# Altium footprint library Connector.PcbLib: 272 footprints (part 10 of 17)
Each footprint in its own frame and in the unit in brackets; x right, y up, seen from the top. Pads: shape width x height; smd on the part's side, far side on the other; paste and mask are expansions set on the pad; w line width, h text height; cw(c..) or ccw(c..) is an arc to the next point about the centre after c.
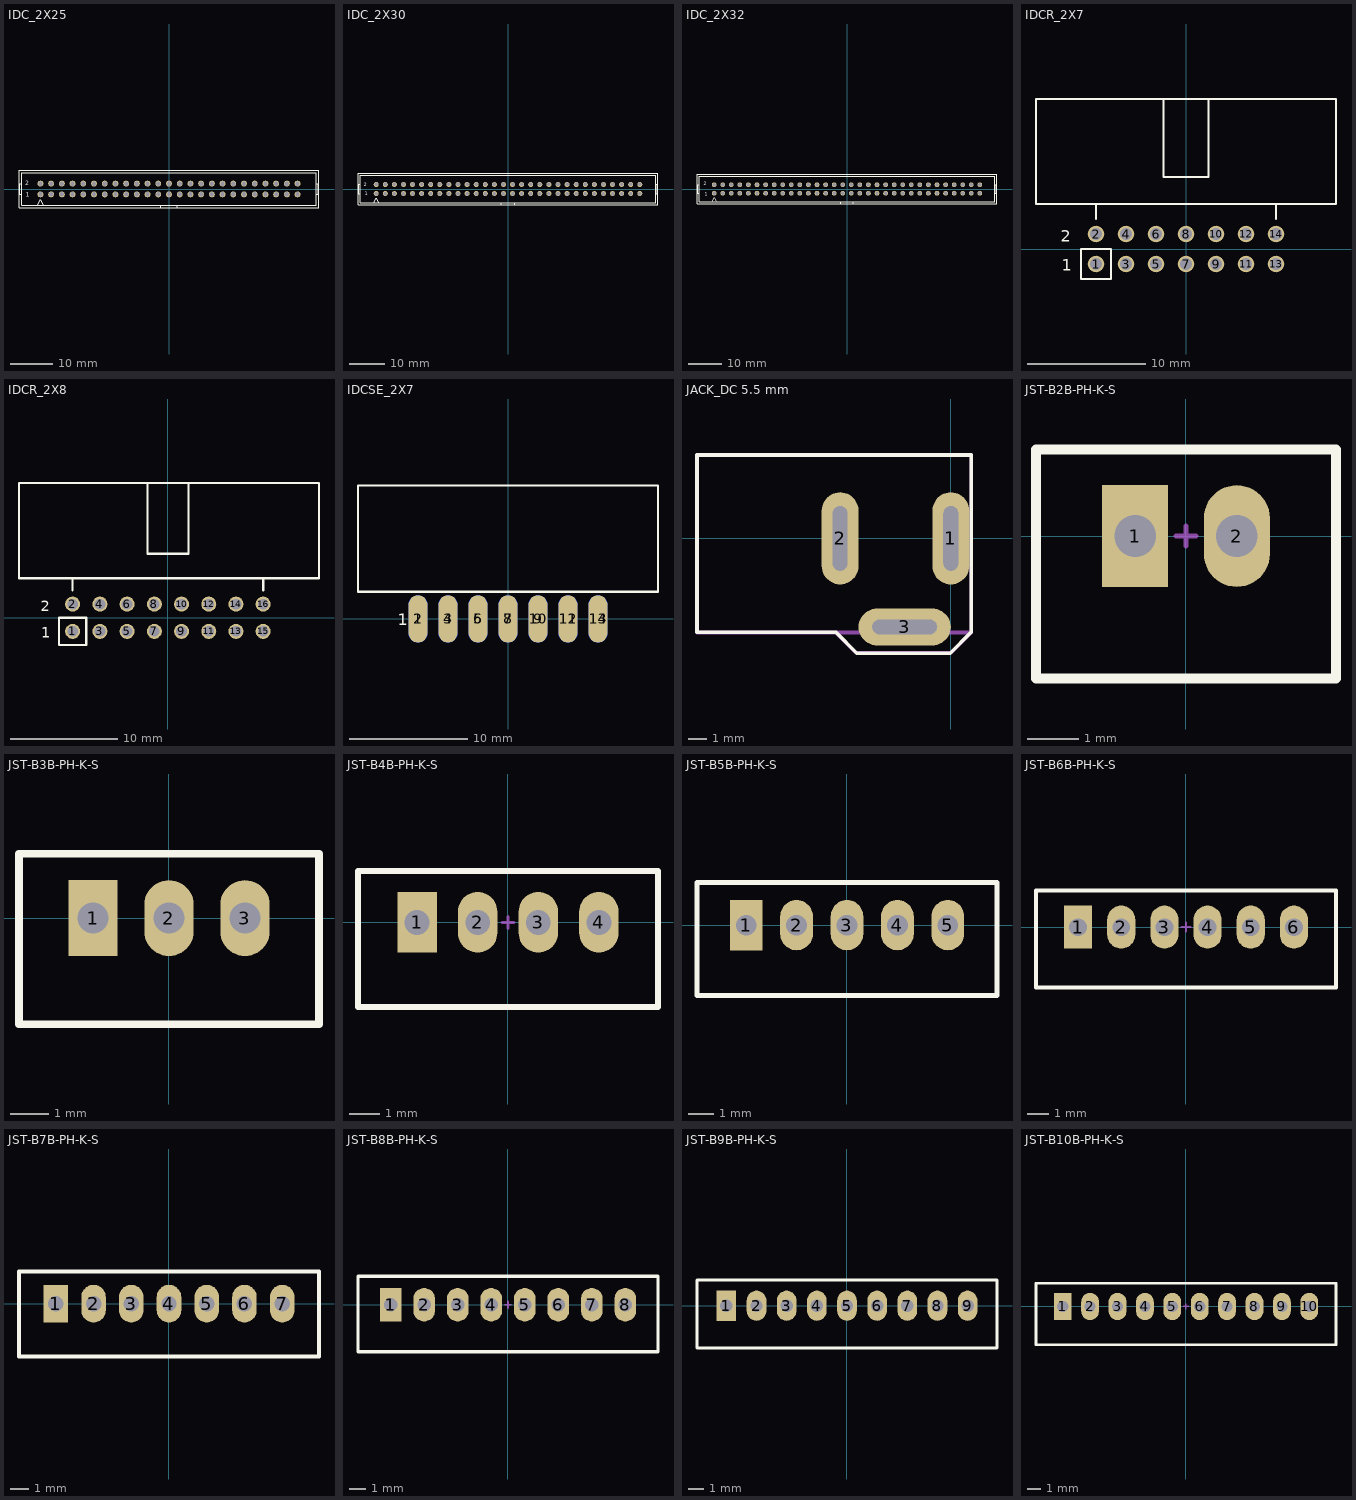
[diagram p9: the footprints below, top view; thin cyan lines are the x and y axes]

## IDC_2X25 [mm]
pads (50):
  round 1.4 / inner round 1.4 / far side oval 1.4x2.2 hole 1 mask+0.1: 1(-30.48,-1.27) 2(-30.48,1.27) 3(-27.94,-1.27) 4(-27.94,1.27) 5(-25.4,-1.27) 6(-25.4,1.27) 7(-22.86,-1.27) 8(-22.86,1.27) 9(-20.32,-1.27) 10(-20.32,1.27) 11(-17.78,-1.27) 12(-17.78,1.27) 13(-15.24,-1.27) 14(-15.24,1.27) 15(-12.7,-1.27) 16(-12.7,1.27) 17(-10.16,-1.27) 18(-10.16,1.27) 19(-7.62,-1.27) 20(-7.62,1.27) 21(-5.08,-1.27) 22(-5.08,1.27) 23(-2.54,-1.27) 24(-2.54,1.27) 25(0,-1.27) 26(0,1.27) 27(2.54,-1.27) 28(2.54,1.27) 29(5.08,-1.27) 30(5.08,1.27) 31(7.62,-1.27) 32(7.62,1.27) 33(10.16,-1.27) 34(10.16,1.27) 35(12.7,-1.27) 36(12.7,1.27) 37(15.24,-1.27) 38(15.24,1.27) 39(17.78,-1.27) 40(17.78,1.27) 41(20.32,-1.27) 42(20.32,1.27) 43(22.86,-1.27) 44(22.86,1.27) 45(25.4,-1.27) 46(25.4,1.27) 47(27.94,-1.27) 48(27.94,1.27) 49(30.48,-1.27) 50(30.48,1.27)
Top Overlay:
  lines w0.2: -35.56,-1.27 -34.925,-1.27 ; -35.56,1.27 -34.925,1.27 ; -35.348,-1.27 -35.348,1.27 ; -31.115,-3.81 -30.48,-2.54 -29.845,-3.81 ; -1.905,-4.445 -1.905,-3.81 ; 1.905,-4.445 1.905,-3.81 ; 34.925,-1.27 35.56,-1.27 ; 34.925,1.27 35.56,1.27 ; 35.348,-1.27 35.348,1.27 ; -1.905,-3.81 -34.925,-3.81 -34.925,3.81 34.925,3.81 34.925,-3.81 1.905,-3.81 ; -1.905,-3.81 1.905,-3.81 ; -35.56,-4.445 -35.56,4.445 35.56,4.445 35.56,-4.445 -35.56,-4.445
  text "1" at -33.909,-1.803 h1
  text "2" at -34.112,0.864 h1
Top Designator:
  text ".Designator" at -3.71,-0.243 h1.52
3D body "61205021621.stp": height 9.13, standoff -2.98, extent -35.58,-4.425 35.58,4.748

## IDC_2X30 [mm]
pads (60):
  round 1.4 / inner round 1.4 / far side oval 1.4x2.2 hole 1 mask+0.1: 1(-36.83,-1.27) 2(-36.83,1.27) 3(-34.29,-1.27) 4(-34.29,1.27) 5(-31.75,-1.27) 6(-31.75,1.27) 7(-29.21,-1.27) 8(-29.21,1.27) 9(-26.67,-1.27) 10(-26.67,1.27) 11(-24.13,-1.27) 12(-24.13,1.27) 13(-21.59,-1.27) 14(-21.59,1.27) 15(-19.05,-1.27) 16(-19.05,1.27) 17(-16.51,-1.27) 18(-16.51,1.27) 19(-13.97,-1.27) 20(-13.97,1.27) 21(-11.43,-1.27) 22(-11.43,1.27) 23(-8.89,-1.27) 24(-8.89,1.27) 25(-6.35,-1.27) 26(-6.35,1.27) 27(-3.81,-1.27) 28(-3.81,1.27) 29(-1.27,-1.27) 30(-1.27,1.27) 31(1.27,-1.27) 32(1.27,1.27) 33(3.81,-1.27) 34(3.81,1.27) 35(6.35,-1.27) 36(6.35,1.27) 37(8.89,-1.27) 38(8.89,1.27) 39(11.43,-1.27) 40(11.43,1.27) 41(13.97,-1.27) 42(13.97,1.27) 43(16.51,-1.27) 44(16.51,1.27) 45(19.05,-1.27) 46(19.05,1.27) 47(21.59,-1.27) 48(21.59,1.27) 49(24.13,-1.27) 50(24.13,1.27) 51(26.67,-1.27) 52(26.67,1.27) 53(29.21,-1.27) 54(29.21,1.27) 55(31.75,-1.27) 56(31.75,1.27) 57(34.29,-1.27) 58(34.29,1.27) 59(36.83,-1.27) 60(36.83,1.27)
Top Overlay:
  lines w0.2: -41.91,-1.27 -41.275,-1.27 ; -41.91,1.27 -41.275,1.27 ; -41.698,-1.27 -41.698,1.27 ; -37.465,-3.81 -36.83,-2.54 -36.195,-3.81 ; -1.905,-4.445 -1.905,-3.81 ; 1.905,-4.445 1.905,-3.81 ; 41.275,-1.27 41.91,-1.27 ; 41.275,1.27 41.91,1.27 ; 41.698,-1.27 41.698,1.27 ; -1.905,-3.81 -41.275,-3.81 -41.275,3.81 41.275,3.81 41.275,-3.81 1.905,-3.81 ; -1.905,-3.81 1.905,-3.81 ; -41.91,-4.445 -41.91,4.445 41.91,4.445 41.91,-4.445 -41.91,-4.445
  text "2" at -40.259,0.813 h1
  text "1" at -40.03,-1.676 h1
Top Designator:
  text ".Designator" at -3.71,-0.243 h1.52
3D body "61206021621.stp": height 9.13, standoff -2.98, extent -41.93,-4.425 41.93,4.748

## IDC_2X32 [mm]
pads (64):
  round 1.4 / inner round 1.4 / far side oval 1.4x2.2 hole 1 mask+0.1: 1(-39.37,-1.27) 2(-39.37,1.27) 3(-36.83,-1.27) 4(-36.83,1.27) 5(-34.29,-1.27) 6(-34.29,1.27) 7(-31.75,-1.27) 8(-31.75,1.27) 9(-29.21,-1.27) 10(-29.21,1.27) 11(-26.67,-1.27) 12(-26.67,1.27) 13(-24.13,-1.27) 14(-24.13,1.27) 15(-21.59,-1.27) 16(-21.59,1.27) 17(-19.05,-1.27) 18(-19.05,1.27) 19(-16.51,-1.27) 20(-16.51,1.27) 21(-13.97,-1.27) 22(-13.97,1.27) 23(-11.43,-1.27) 24(-11.43,1.27) 25(-8.89,-1.27) 26(-8.89,1.27) 27(-6.35,-1.27) 28(-6.35,1.27) 29(-3.81,-1.27) 30(-3.81,1.27) 31(-1.27,-1.27) 32(-1.27,1.27) 33(1.27,-1.27) 34(1.27,1.27) 35(3.81,-1.27) 36(3.81,1.27) 37(6.35,-1.27) 38(6.35,1.27) 39(8.89,-1.27) 40(8.89,1.27) 41(11.43,-1.27) 42(11.43,1.27) 43(13.97,-1.27) 44(13.97,1.27) 45(16.51,-1.27) 46(16.51,1.27) 47(19.05,-1.27) 48(19.05,1.27) 49(21.59,-1.27) 50(21.59,1.27) 51(24.13,-1.27) 52(24.13,1.27) 53(26.67,-1.27) 54(26.67,1.27) 55(29.21,-1.27) 56(29.21,1.27) 57(31.75,-1.27) 58(31.75,1.27) 59(34.29,-1.27) 60(34.29,1.27) 61(36.83,-1.27) 62(36.83,1.27) 63(39.37,-1.27) 64(39.37,1.27)
Top Overlay:
  lines w0.2: -44.45,-1.27 -43.815,-1.27 ; -44.45,1.27 -43.815,1.27 ; -44.238,-1.27 -44.238,1.27 ; -40.005,-3.81 -39.37,-2.54 -38.735,-3.81 ; -1.905,-4.445 -1.905,-3.81 ; 1.905,-4.445 1.905,-3.81 ; 43.815,-1.27 44.45,-1.27 ; 43.815,1.27 44.45,1.27 ; 44.238,-1.27 44.238,1.27 ; -1.905,-3.81 1.905,-3.81 ; -1.905,-3.81 -43.815,-3.81 -43.815,3.81 43.815,3.81 43.815,-3.81 1.905,-3.81 ; -44.45,-4.445 44.45,-4.445 44.45,4.445 -44.45,4.445 -44.45,-4.445
  text "2" at -42.393,1.041 h1
  text "1" at -42.164,-1.93 h1
Top Designator:
  text ".Designator" at -3.71,-0.243 h1.52
3D body "61206421621.stp": height 9.13, standoff -2.98, extent -44.47,-4.425 44.47,4.748

## IDCR_2X7 [mm]
pads (14):
  round 1.4 / inner round 1.4 / far side oval 1.4x2.2 hole 1 mask+0.1: 1(-7.62,-1.27) 2(-7.62,1.27) 3(-5.08,-1.27) 4(-5.08,1.27) 5(-2.54,-1.27) 6(-2.54,1.27) 7(0,-1.27) 8(0,1.27) 9(2.54,-1.27) 10(2.54,1.27) 11(5.08,-1.27) 12(5.08,1.27) 13(7.62,-1.27) 14(7.62,1.27)
Top Overlay:
  lines w0.2: -7.62,2.54 -7.62,3.81 ; -1.905,12.7 -1.905,6.096 1.905,6.096 1.905,12.7 ; 7.62,2.54 7.62,3.81 ; -12.7,3.81 12.7,3.81 12.7,12.7 -12.7,12.7 -12.7,3.81 ; -8.89,-2.54 -8.89,0 -6.35,0 -6.35,-2.54 -8.89,-2.54
  text "2" at -10.6,0.6 h1
  text "1" at -10.541,-1.854 h1
Top Designator:
  text ".Designator" at -3.71,4.736 h1.52
3D body "D2514-5002-AR (14P_RA).STEP": height 8.64, standoff -2.84, extent -12.548,-1.587 12.548,11.176

## IDCR_2X8 [mm]
pads (16):
  round 1.4 / inner round 1.4 / far side oval 1.4x2.2 hole 1 mask+0.1: 1(-8.89,-1.27) 2(-8.89,1.27) 3(-6.35,-1.27) 4(-6.35,1.27) 5(-3.81,-1.27) 6(-3.81,1.27) 7(-1.27,-1.27) 8(-1.27,1.27) 9(1.27,-1.27) 10(1.27,1.27) 11(3.81,-1.27) 12(3.81,1.27) 13(6.35,-1.27) 14(6.35,1.27) 15(8.89,-1.27) 16(8.89,1.27)
Top Overlay:
  lines w0.2: -8.89,2.54 -8.89,3.7 ; -1.905,12.57 -1.905,5.966 1.905,5.966 1.905,12.57 ; 8.89,2.54 8.89,3.7 ; -13.9,3.68 -13.9,12.57 14.1,12.57 14.1,3.68 -13.9,3.68 ; -10.16,-2.54 -7.62,-2.54 -7.62,0 -10.16,0 -10.16,-2.54
  text "1" at -11.811,-1.854 h1
  text "2" at -11.87,0.6 h1
Top Designator:
  text ".Designator" at -3.61,4.671 h1.52
3D body "Box Header 3M 2516_RA.STEP": height 8.64, standoff -2.84, extent -13.818,-1.581 13.818,11.176

## IDCSE_2X7 [mm] "IDC, HEADER BOX 2X7, 14p, 2.54mm pitch, EDGE of Board"
pads (14):
  oval 1.6x4 smd mask+0.1: 1(-7.62,0) 3(-5.08,0) 5(-2.54,0) 7(0,0) 9(2.54,0) 11(5.08,0) 13(7.62,0)
  oval 1.6x4 smd far side mask+0.1: 2(-7.62,0) 4(-5.08,0) 6(-2.54,0) 8(0,0) 10(2.54,0) 12(5.08,0) 14(7.62,0)
Top Overlay:
  lines w0.2: -12.7,2.3 12.7,2.3 12.7,11.3 -12.7,11.3 -12.7,2.3
  text "1" at -9.341,-0.554 h1
Top Designator:
  text ".Designator" at -3.71,4.306 h1.52
Mechanical 15:
  text "2" at -8.8,-0.5 h1
3D body "TE_1-1634688-4_IDC14_V.STEP": height 4.23, standoff -4.87, extent -12.715,-1.1 12.715,11.2

## JACK_DC 5.5 mm [mm]
pads (3):
  oval 2x5 hole 0.8 slot 3.5 at 90 deg: 1(0,0) 2(-6,0)
  oval 5x2 hole 0.8 slot 3.5 at 0 deg: 3(-2.5,-4.8)
Top Overlay:
  lines w0.178: -5.1,-6.223 -0.038,-6.223
  lines w0.2: -5.1,-6.223 -6.243,-5.08 -13.754,-5.08 -13.754,4.521 1.105,4.521 1.105,-2.591 1.105,-5.08 -0.038,-6.223
Top Designator:
  lines w0.2: -6.24,-5.1 -5.14,-6.2 -4.28,-6.2 0.01,-6.2 1.11,-5.1 ; 1.11,-5.1 -13.74,-5.1 -13.74,4.52 1.11,4.52 1.11,0.02 1.11,-5.1
  text ".Designator" at -10.032,-1.195 h1.52
Mechanical 6:
  lines w0.2: -6.24,-5.1 -5.14,-6.2 -4.28,-6.2 0.01,-6.2 1.11,-5.1 ; 1.11,-5.1 -13.74,-5.1 -13.74,4.52 1.11,4.52 1.11,0.02 1.11,-5.1
3D body "Jack DC.STEP": height 11, standoff -3.5, extent -13.738,-5.075 0.362,4.525

## JST-B2B-PH-K-S [mm]
pads (2):
  rect 1.3x2 hole 0.82: 1(-1,0)
  oval 1.3x2 hole 0.82: 2(1,0)
Top Overlay:
  lines w0.2: -2.95,-2.8 2.95,-2.8 2.95,1.7 -2.95,1.7 -2.95,-2.8
Top Designator:
  text ".Designator" at -3.71,-0.894 h1.52
Mechanical 15:
  lines w0.1: -0.2,0 0.2,0 ; 0,-0.2 0,0.2
3D body "JST-B2B-PH-K-S.STEP": height 6.01, standoff -3.39, extent -2.95,-2.8 2.95,1.7

## JST-B3B-PH-K-S [mm]
pads (3):
  rect 1.3x2 hole 0.82: 1(-2,0)
  oval 1.3x2 hole 0.82: 2(0,0) 3(2,0)
Top Overlay:
  lines w0.2: -3.95,-2.8 3.95,-2.8 3.95,1.7 -3.95,1.7 -3.95,-2.8
Top Designator:
  text ".Designator" at -3.71,-0.894 h1.52
Mechanical 15:
  lines w0.1: -0.2,0 0.2,0 ; 0,-0.2 0,0.2
3D body "JST-B3B-PH-K-S.STEP": height 6.01, standoff -3.39, extent -3.95,-2.8 3.95,1.7

## JST-B4B-PH-K-S [mm]
pads (4):
  rect 1.3x2 hole 0.82: 1(-3,0)
  oval 1.3x2 hole 0.82: 2(-1,0) 3(1,0) 4(3,0)
Top Overlay:
  lines w0.2: -4.95,-2.8 -4.95,1.7 4.95,1.7 4.95,-2.8 -4.95,-2.8
Top Designator:
  text ".Designator" at -3.71,-0.894 h1.52
Mechanical 15:
  lines w0.1: -0.2,0 0.2,0 ; 0,-0.2 0,0.2
3D body "JST-B4B-PH-K-S.STEP": height 6.01, standoff -3.39, extent -4.95,-2.8 4.95,1.7

## JST-B5B-PH-K-S [mm]
pads (5):
  rect 1.3x2 hole 0.82: 1(-4,0)
  oval 1.3x2 hole 0.82: 2(-2,0) 3(0,0) 4(2,0) 5(4,0)
Top Overlay:
  lines w0.2: -5.95,-2.8 5.95,-2.8 5.95,1.7 -5.95,1.7 -5.95,-2.8
Top Designator:
  text ".Designator" at -3.71,-0.894 h1.52
Mechanical 15:
  lines w0.1: -0.2,0 0.2,0 ; 0,-0.2 0,0.2
3D body "JST-B5B-PH-K-S.STEP": height 6.01, standoff -3.39, extent -5.95,-2.8 5.95,1.7

## JST-B6B-PH-K-S [mm]
pads (6):
  rect 1.3x2 hole 0.82: 1(-5,0)
  oval 1.3x2 hole 0.82: 2(-3,0) 3(-1,0) 4(1,0) 5(3,0) 6(5,0)
Top Overlay:
  lines w0.2: 6.95,-2.8 -6.95,-2.8 -6.95,1.7 6.95,1.7 ; 6.95,-2.8 6.95,1.7
Top Designator:
  text ".Designator" at -3.71,-0.894 h1.52
Mechanical 15:
  lines w0.1: -0.2,0 0.2,0 ; 0,-0.2 0,0.2
3D body "JST-B6B-PH-K-S.STEP": height 6.01, standoff -3.39, extent -6.95,-2.8 6.95,1.7

## JST-B7B-PH-K-S [mm]
pads (7):
  rect 1.3x2 hole 0.82: 1(-6,0)
  oval 1.3x2 hole 0.82: 2(-4,0) 3(-2,0) 4(0,0) 5(2,0) 6(4,0) 7(6,0)
Top Overlay:
  lines w0.2: -7.95,-2.8 7.95,-2.8 7.95,1.7 -7.95,1.7 -7.95,-2.8
Top Designator:
  text ".Designator" at -3.71,-0.894 h1.52
Mechanical 15:
  lines w0.1: -0.2,0 0.2,0 ; 0,-0.2 0,0.2
3D body "JST-B7B-PH-K-S.STEP": height 6.01, standoff -3.39, extent -7.95,-2.8 7.95,1.7

## JST-B8B-PH-K-S [mm]
pads (8):
  rect 1.3x2 hole 0.82: 1(-7,0)
  oval 1.3x2 hole 0.82: 2(-5,0) 3(-3,0) 4(-1,0) 5(1,0) 6(3,0) 7(5,0) 8(7,0)
Top Overlay:
  lines w0.2: -8.95,-2.8 -8.95,1.7 8.95,1.7 8.95,-2.8 -8.95,-2.8
Top Designator:
  text ".Designator" at -3.71,-0.894 h1.52
Mechanical 15:
  lines w0.1: -0.2,0 0.2,0 ; 0,-0.2 0,0.2
3D body "JST-B8B-PH-K-S.STEP": height 6.01, standoff -3.39, extent -8.95,-2.8 8.95,1.7

## JST-B9B-PH-K-S [mm]
pads (9):
  rect 1.3x2 hole 0.82: 1(-8,0)
  oval 1.3x2 hole 0.82: 2(-6,0) 3(-4,0) 4(-2,0) 5(0,0) 6(2,0) 7(4,0) 8(6,0) 9(8,0)
Top Overlay:
  lines w0.2: -9.95,-2.8 9.95,-2.8 9.95,1.7 -9.95,1.7 -9.95,-2.8
Top Designator:
  text ".Designator" at -3.71,-0.894 h1.52
Mechanical 15:
  lines w0.1: -0.2,0 0.2,0 ; 0,-0.2 0,0.2
3D body "JST-B9B-PH-K-S.STEP": height 6.01, standoff -3.39, extent -9.95,-2.8 9.95,1.7

## JST-B10B-PH-K-S [mm]
pads (10):
  rect 1.3x2 hole 0.82: 1(-9,0)
  oval 1.3x2 hole 0.82: 2(-7,0) 3(-5,0) 4(-3,0) 5(-1,0) 6(1,0) 7(3,0) 8(5,0) 9(7,0) 10(9,0)
Top Overlay:
  lines w0.2: -10.95,-2.8 -10.95,1.7 10.95,1.7 10.95,-2.8 -10.95,-2.8
Top Designator:
  text ".Designator" at -3.71,-0.894 h1.52
Mechanical 15:
  lines w0.1: -0.2,0 0.2,0 ; 0,-0.2 0,0.2
3D body "JST-B10B-PH-K-S.STEP": height 6.01, standoff -3.39, extent -10.95,-2.8 10.95,1.7